# Altium footprint library 1844210.PcbLib: 1 footprints
Each footprint in its own frame and in the unit in brackets; x right, y up, seen from the top. Pads: shape width x height; smd on the part's side, far side on the other; paste and mask are expansions set on the pad; w line width, h text height; cw(c..) or ccw(c..) is an arc to the next point about the centre after c.
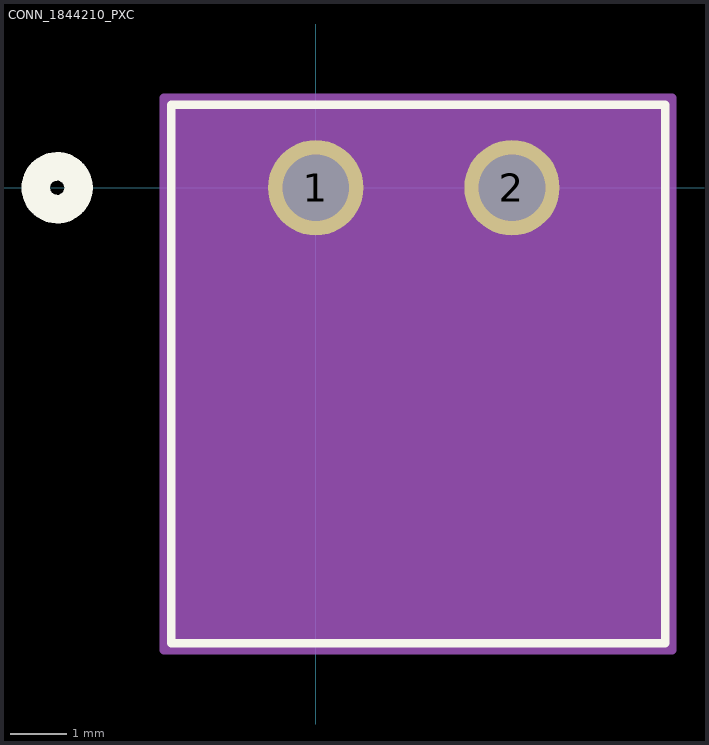
[diagram p0: the footprint, top view; thin cyan lines are the x and y axes]

## CONN_1844210_PXC [mil]
pads (2):
  round 67 hole 47 paste-33.5 mask+0: 1(0,0) 2(137.8,0)
Top Overlay:
  circle w20: c-181.65,0 r15
  lines w6: -101.65,-319.85 245.35,-319.85 245.35,58.15 -101.65,58.15 -101.65,-319.85
  text ".Designator" at -65.65,-25 h50
Bottom Overlay:
  circle w20: c-181.65,0 r15
Mechanical 13:
  circle w20: c0,0 r15
  lines w1: -96.65,-314.85 240.35,-314.85 240.35,53.15 -96.65,53.15 -96.65,-314.85
  text ".Designator" at -65.65,-25 h50
Mechanical 15:
  region: 250.35,63.15 -106.65,63.15 -106.65,-324.85 250.35,-324.85
  lines w6: -106.65,-324.85 -106.65,63.15 250.35,63.15 250.35,-324.85 -106.65,-324.85